# Altium footprint library 2020-05-10_10-16-09.PcbLib: 3 footprints
Each footprint in its own frame and in the unit in brackets; x right, y up, seen from the top. Pads: shape width x height; smd on the part's side, far side on the other; paste and mask are expansions set on the pad; w line width, h text height; cw(c..) or ccw(c..) is an arc to the next point about the centre after c.
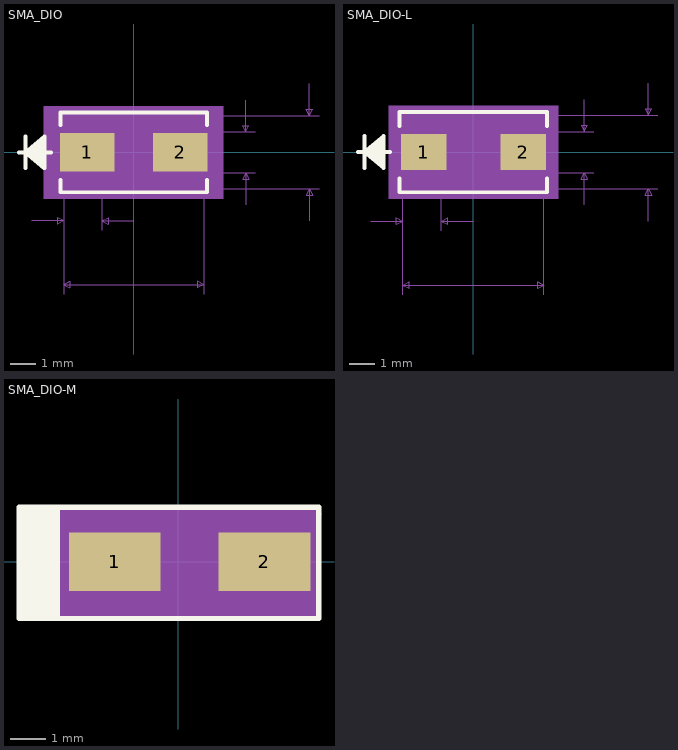
[diagram p0: the footprints below, top view; thin cyan lines are the x and y axes]

## SMA_DIO [mil]
pads (2):
  rect 85.84x60.17 smd paste+0 mask+0: 1(-73.12,0) 2(73.12,0)
Top Overlay:
  lines w6: -180.04,0 -130.04,0 ; -170.04,-25 -170.04,25 ; -140.04,-20 -170.04,0 ; -140.04,-15 -170.04,0 ; -140.04,-10 -170.04,0 ; -140.04,-5 -170.04,0 ; -140.04,5 -170.04,0 ; -140.04,10 -170.04,0 ; -140.04,15 -170.04,0 ; -140.04,20 -170.04,0 ; -115.04,-43.19 -115.04,-62.48 115.04,-62.48 115.04,-43.19 ; -115.04,43.19 -115.04,62.48 115.04,62.48 115.04,43.19 ; -170.04,0 -140.04,25 -140.04,-25 -170.04,0
Mechanical 5:
  region: 141.04,-72.48 -141.04,-72.48 -141.04,72.48 141.04,72.48
Mechanical 7:
  lines w1: -160.04,-107.48 -110.04,-107.48 ; -110.04,-222.48 -110.04,0 -110.04,-122.48 ; -50.2,-122.48 -50.2,0 ; -0.2,-107.48 -50.2,-107.48 ; 110.04,-222.48 110.04,0 ; 126.04,-57.48 291.04,-57.48 ; 126.04,-32.09 191.04,-32.09 ; 126.04,32.09 191.04,32.09 ; 126.04,57.48 291.04,57.48 ; 176.04,-82.09 176.04,-32.09 ; 176.04,82.09 176.04,32.09 ; 276.04,-107.48 276.04,-57.48 ; 276.04,107.48 276.04,57.48 ; -110.04,-207.48 110.04,-207.48 ; -110.04,-207.48 -100.04,-202.48 -100.04,-212.48 -110.04,-207.48 ; -110.04,-107.48 -120.04,-102.48 -120.04,-112.48 -110.04,-107.48 ; -50.2,-107.48 -40.2,-102.48 -40.2,-112.48 -50.2,-107.48 ; 110.04,-207.48 100.04,-202.48 100.04,-212.48 110.04,-207.48 ; 176.04,-32.09 171.04,-42.09 181.04,-42.09 176.04,-32.09 ; 176.04,32.09 171.04,42.09 181.04,42.09 176.04,32.09 ; 276.04,-57.48 271.04,-67.48 281.04,-67.48 276.04,-57.48 ; 276.04,57.48 271.04,67.48 281.04,67.48 276.04,57.48
  text "Default Padstyle: RX85p84Y60p17D0T" at -425,-332.48 h50
  text "Alt 1 Padstyle: OX60Y90D30P" at -337.5,-407.48 h50
  text "Alt 2 Padstyle: OX90Y60D30P" at -337.5,-482.48 h50
  text "0.064in/1.63mm" at 196.04,-12.5 h25
  text "0.115in/2.92mm" at 296.04,-12.5 h25
  text "0.22in/5.59mm" at -81.25,-252.48 h25
  text "0.06in/1.52mm" at -161.37,-152.48 h25
Mechanical 13:
  lines w1: -180.04,0 -130.04,0 ; -170.04,-25 -170.04,25 ; -140.04,-20 -170.04,0 ; -140.04,-15 -170.04,0 ; -140.04,-10 -170.04,0 ; -140.04,-5 -170.04,0 ; -140.04,5 -170.04,0 ; -140.04,10 -170.04,0 ; -140.04,15 -170.04,0 ; -140.04,20 -170.04,0 ; -170.04,0 -140.04,25 -140.04,-25 -170.04,0 ; -110.04,-57.48 110.04,-57.48 110.04,57.48 -110.04,57.48 -110.04,-57.48
Mechanical 15:
  region: -120.04,-42.09 -126.04,-42.09 -126.04,42.09 -120.04,42.09 -120.04,67.48 120.04,67.48 120.04,42.09 126.04,42.09 126.04,-42.09 120.04,-42.09 120.04,-67.48 -120.04,-67.48
  lines w6: -126.04,-42.09 -126.04,42.09 -120.04,42.09 -120.04,67.48 120.04,67.48 120.04,42.09 126.04,42.09 126.04,-42.09 120.04,-42.09 120.04,-67.48 -120.04,-67.48 -120.04,-42.09 -126.04,-42.09
3D body: height 10, standoff 0, extent 0,0 10,10

## SMA_DIO-L [mil]
pads (2):
  rect 70.84x56.17 smd paste+0 mask+0: 1(-77.62,0) 2(77.62,0)
Top Overlay:
  lines w6: -180.04,0 -130.04,0 ; -170.04,-25 -170.04,25 ; -140.04,-20 -170.04,0 ; -140.04,-15 -170.04,0 ; -140.04,-10 -170.04,0 ; -140.04,-5 -170.04,0 ; -140.04,5 -170.04,0 ; -140.04,10 -170.04,0 ; -140.04,15 -170.04,0 ; -140.04,20 -170.04,0 ; -115.04,-41.03 -115.04,-62.48 115.04,-62.48 115.04,-41.03 ; -115.04,41.03 -115.04,62.48 115.04,62.48 115.04,41.03 ; -170.04,0 -140.04,-25 -140.04,25 -170.04,0
Mechanical 5:
  region: 132.04,-72.48 -132.04,-72.48 -132.04,72.48 132.04,72.48
Mechanical 7:
  lines w1: -160.04,-107.48 -110.04,-107.48 ; -110.04,-222.48 -110.04,0 -110.04,-122.48 ; -50.2,-122.48 -50.2,0 ; -0.2,-107.48 -50.2,-107.48 ; 110.04,-222.48 110.04,0 ; 123.04,-57.48 288.04,-57.48 ; 123.04,-32.09 188.04,-32.09 ; 123.04,32.09 188.04,32.09 ; 123.04,57.48 288.04,57.48 ; 173.04,-82.09 173.04,-32.09 ; 173.04,82.09 173.04,32.09 ; 273.04,-107.48 273.04,-57.48 ; 273.04,107.48 273.04,57.48 ; -110.04,-207.48 -100.04,-212.48 -100.04,-202.48 -110.04,-207.48 ; -110.04,-207.48 110.04,-207.48 ; -110.04,-107.48 -120.04,-112.48 -120.04,-102.48 -110.04,-107.48 ; -50.2,-107.48 -40.2,-112.48 -40.2,-102.48 -50.2,-107.48 ; 110.04,-207.48 100.04,-212.48 100.04,-202.48 110.04,-207.48 ; 173.04,-32.09 178.04,-42.09 168.04,-42.09 173.04,-32.09 ; 173.04,32.09 178.04,42.09 168.04,42.09 173.04,32.09 ; 273.04,-57.48 278.04,-67.48 268.04,-67.48 273.04,-57.48 ; 273.04,57.48 278.04,67.48 268.04,67.48 273.04,57.48
  text "0.06in/1.52mm" at -161.37,-152.48 h25
  text "0.22in/5.59mm" at -81.25,-252.48 h25
  text "0.115in/2.92mm" at 293.04,-12.5 h25
  text "0.064in/1.63mm" at 193.04,-12.5 h25
  text "Alt 2 Padstyle: OX90Y60D30P" at -337.5,-482.48 h50
  text "Alt 1 Padstyle: OX60Y90D30P" at -337.5,-407.48 h50
  text "Default Padstyle: RX70p84Y56p17D0T" at -425,-332.48 h50
Mechanical 13:
  lines w1: -180.04,0 -130.04,0 ; -170.04,-25 -170.04,25 ; -140.04,-20 -170.04,0 ; -140.04,-15 -170.04,0 ; -140.04,-10 -170.04,0 ; -140.04,-5 -170.04,0 ; -140.04,5 -170.04,0 ; -140.04,10 -170.04,0 ; -140.04,15 -170.04,0 ; -140.04,20 -170.04,0 ; -170.04,0 -140.04,-25 -140.04,25 -170.04,0 ; -110.04,-57.48 -110.04,57.48 110.04,57.48 110.04,-57.48 -110.04,-57.48
Mechanical 15:
  region: -114.04,-36.09 -117.04,-36.09 -117.04,36.09 -114.04,36.09 -114.04,61.48 114.04,61.48 114.04,36.09 117.04,36.09 117.04,-36.09 114.04,-36.09 114.04,-61.48 -114.04,-61.48
  lines w6: -117.04,-36.09 -114.04,-36.09 -114.04,-61.48 114.04,-61.48 114.04,-36.09 117.04,-36.09 117.04,36.09 114.04,36.09 114.04,61.48 -114.04,61.48 -114.04,36.09 -117.04,36.09 -117.04,-36.09
3D body: height 10, standoff 0, extent 0,0 10,10

## SMA_DIO-M [mm]
pads (2):
  rect 2.561x1.63 smd paste+0 mask+0: 1(-1.768,0) 2(2.413,0)
Top Overlay:
  rectangle: -4.445,-1.651 -3.302,1.524
  lines w0.152: -4.445,-1.587 3.937,-1.587 3.937,-1.148 3.937,1.524 -4.445,1.524 -4.445,-1.587
Mechanical 5:
  region: 3.938,-1.524 -3.938,-1.524 -3.938,1.397 3.938,1.397
Mechanical 13:
  lines w0.025: -2.795,-1.46 2.795,-1.46 2.795,1.46 -2.795,1.46 -2.795,-1.46
Mechanical 15:
  region: -3.303,-1.323 -3.557,-1.323 -3.557,1.323 -3.303,1.323 -3.303,1.524 3.937,1.524 3.937,-1.651 -3.303,-1.651
  lines w0.152: -3.557,-1.323 -3.557,1.323 -3.302,1.323 3.937,1.323 3.557,1.323 3.557,-1.323 3.303,-1.323 3.303,-1.587 -3.303,-1.587 -3.303,-1.323 -3.557,-1.323
3D body "User Library-DO-214AC(SMA).STEP": height 2.29, standoff 0, extent -2.616,-1.397 2.87,1.397
3D body: height 0.25, standoff 0, extent 0,0 0.254,0.254